# Altium integrated library ADG708BRUZ.IntLib: 1 symbol
Pins are listed as number, name and electrical type; pins without a type are passive.

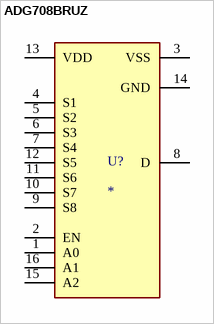
[diagram p0: symbol ADG708BRUZ]

## ADG708BRUZ
designator U?
1 Circuit IC Switch 8:1 4.5Ohm 16-TSSOP; MP: ADG708BRUZ-REEL7; MF: Analog Devices; Price: None; Availability: Good; SnapEDA_Link: https://www.snapeda.com/parts/ADG708BRUZ-REEL7/Analog%20Devices%20Inc./view-part/1237689/?ref=snap; Value: *; Check_prices: https://www.snapeda.com/parts/ADG708BRUZ-REEL7/Analog%20Devices%20Inc./view-part/1237689/?ref=eda; Package: TSSOP-16 Analog Devices; Purchase-URL: https://pricing.snapeda.com/search/part/ADG708BRUZ-REEL7/?ref=eda
footprint TSSOP16
pins: 1 A0, 2 EN, 3 VSS, 4 S1, 5 S2, 6 S3, 7 S4, 8 D, 9 S8, 10 S7, 11 S6, 12 S5, 13 VDD, 14 GND, 15 A2, 16 A1